# Altium schematic symbol library PCB-MAIN.SchLib: 248 symbols
Pins are listed as number, name and electrical type; pins without a type are passive.

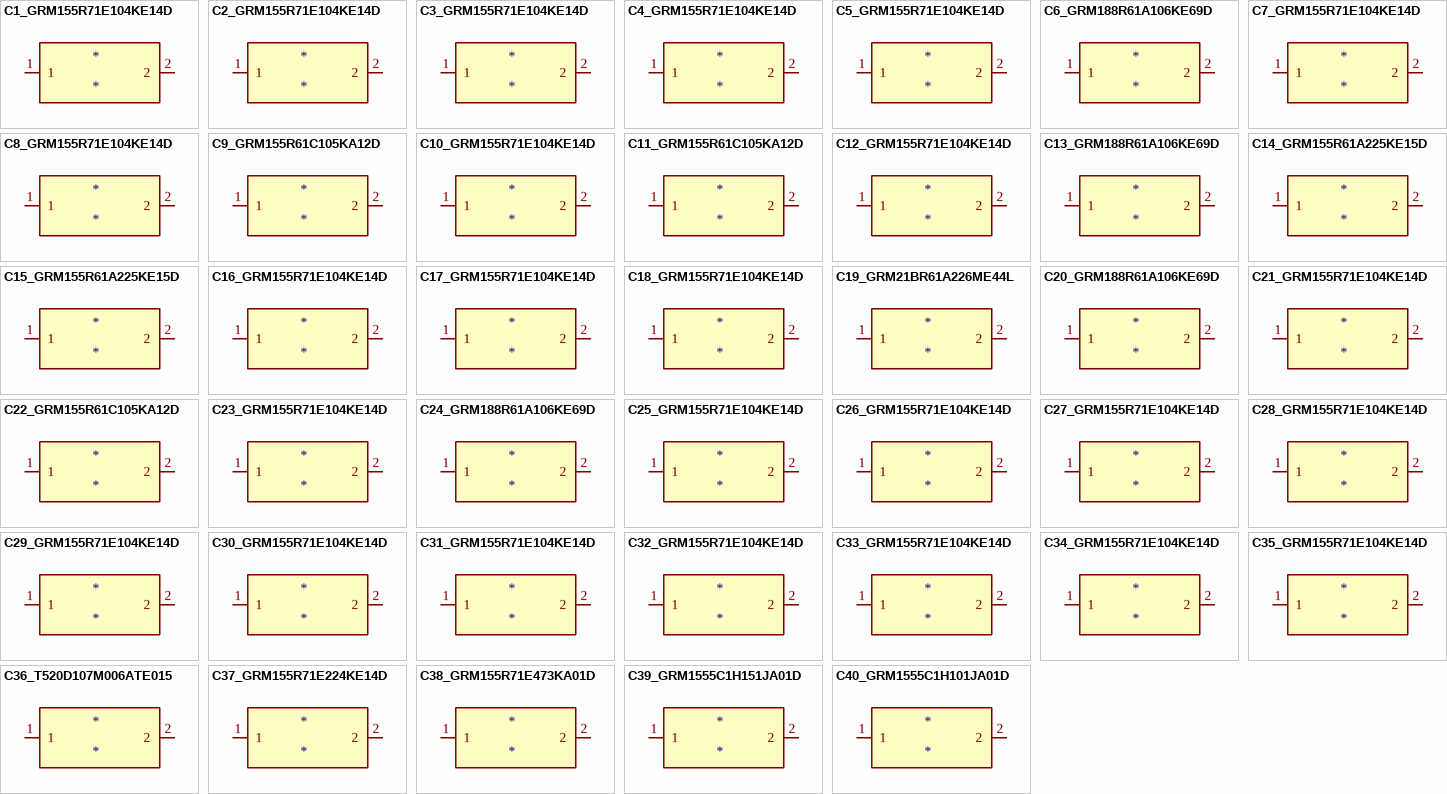
[diagram p0: symbols C1_GRM155R71E104KE14D to C40_GRM1555C1H101JA01D]

## C1_GRM155R71E104KE14D
designator *
pins: 1, 2

## C2_GRM155R71E104KE14D
designator *
pins: 1, 2

## C3_GRM155R71E104KE14D
designator *
pins: 1, 2

## C4_GRM155R71E104KE14D
designator *
pins: 1, 2

## C5_GRM155R71E104KE14D
designator *
pins: 1, 2

## C6_GRM188R61A106KE69D
designator *
pins: 1, 2

## C7_GRM155R71E104KE14D
designator *
pins: 1, 2

## C8_GRM155R71E104KE14D
designator *
pins: 1, 2

## C9_GRM155R61C105KA12D
designator *
pins: 1, 2

## C10_GRM155R71E104KE14D
designator *
pins: 1, 2

## C11_GRM155R61C105KA12D
designator *
pins: 1, 2

## C12_GRM155R71E104KE14D
designator *
pins: 1, 2

## C13_GRM188R61A106KE69D
designator *
pins: 1, 2

## C14_GRM155R61A225KE15D
designator *
pins: 1, 2

## C15_GRM155R61A225KE15D
designator *
pins: 1, 2

## C16_GRM155R71E104KE14D
designator *
pins: 1, 2

## C17_GRM155R71E104KE14D
designator *
pins: 1, 2

## C18_GRM155R71E104KE14D
designator *
pins: 1, 2

## C19_GRM21BR61A226ME44L
designator *
pins: 1, 2

## C20_GRM188R61A106KE69D
designator *
pins: 1, 2

## C21_GRM155R71E104KE14D
designator *
pins: 1, 2

## C22_GRM155R61C105KA12D
designator *
pins: 1, 2

## C23_GRM155R71E104KE14D
designator *
pins: 1, 2

## C24_GRM188R61A106KE69D
designator *
pins: 1, 2

## C25_GRM155R71E104KE14D
designator *
pins: 1, 2

## C26_GRM155R71E104KE14D
designator *
pins: 1, 2

## C27_GRM155R71E104KE14D
designator *
pins: 1, 2

## C28_GRM155R71E104KE14D
designator *
pins: 1, 2

## C29_GRM155R71E104KE14D
designator *
pins: 1, 2

## C30_GRM155R71E104KE14D
designator *
pins: 1, 2

## C31_GRM155R71E104KE14D
designator *
pins: 1, 2

## C32_GRM155R71E104KE14D
designator *
pins: 1, 2

## C33_GRM155R71E104KE14D
designator *
pins: 1, 2

## C34_GRM155R71E104KE14D
designator *
pins: 1, 2

## C35_GRM155R71E104KE14D
designator *
pins: 1, 2

## C36_T520D107M006ATE015
designator *
pins: 1, 2

## C37_GRM155R71E224KE14D
designator *
pins: 1, 2

## C38_GRM155R71E473KA01D
designator *
pins: 1, 2

## C39_GRM1555C1H151JA01D
designator *
pins: 1, 2

## C40_GRM1555C1H101JA01D
designator *
pins: 1, 2

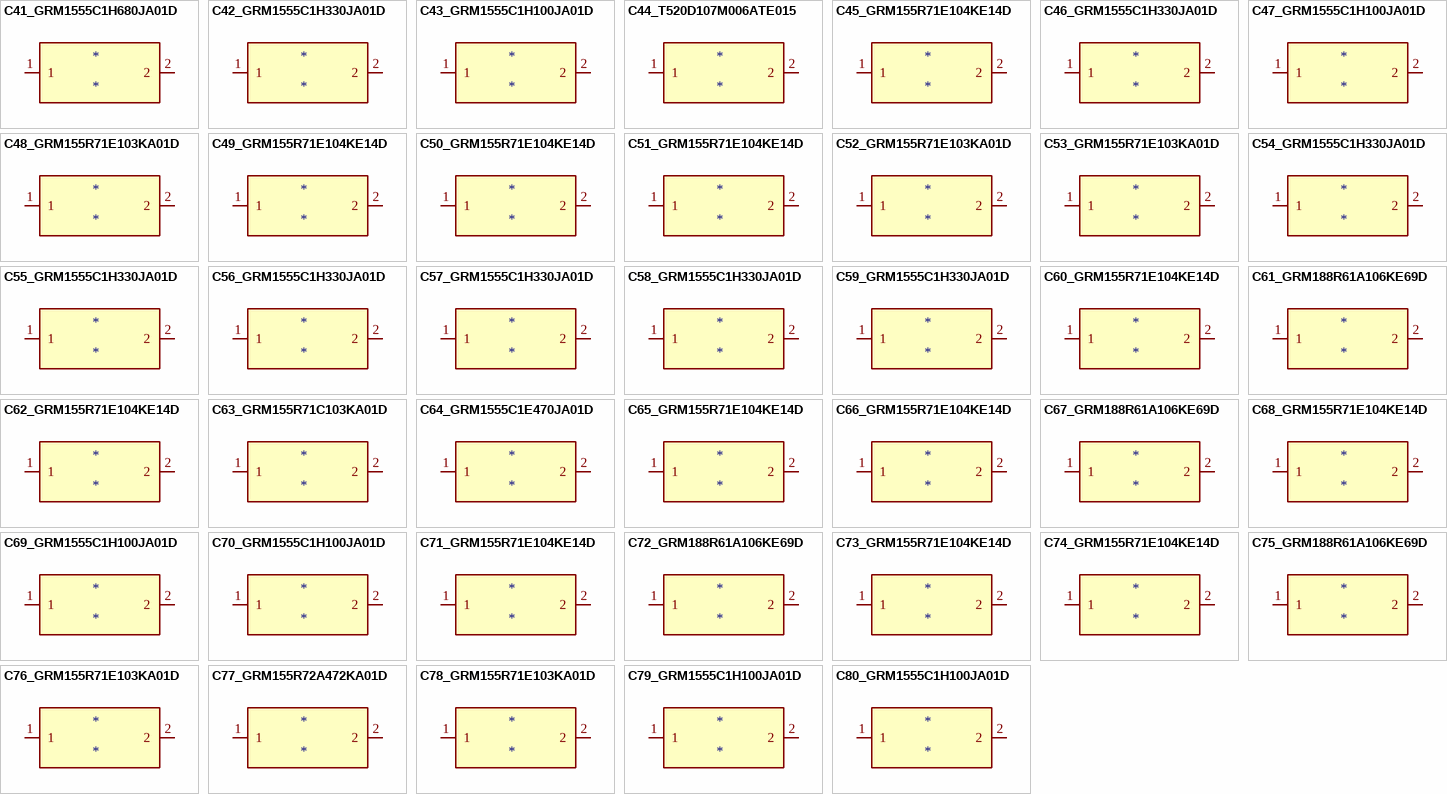
[diagram p1: symbols C41_GRM1555C1H680JA01D to C80_GRM1555C1H100JA01D]

## C41_GRM1555C1H680JA01D
designator *
pins: 1, 2

## C42_GRM1555C1H330JA01D
designator *
pins: 1, 2

## C43_GRM1555C1H100JA01D
designator *
pins: 1, 2

## C44_T520D107M006ATE015
designator *
pins: 1, 2

## C45_GRM155R71E104KE14D
designator *
pins: 1, 2

## C46_GRM1555C1H330JA01D
designator *
pins: 1, 2

## C47_GRM1555C1H100JA01D
designator *
pins: 1, 2

## C48_GRM155R71E103KA01D
designator *
pins: 1, 2

## C49_GRM155R71E104KE14D
designator *
pins: 1, 2

## C50_GRM155R71E104KE14D
designator *
pins: 1, 2

## C51_GRM155R71E104KE14D
designator *
pins: 1, 2

## C52_GRM155R71E103KA01D
designator *
pins: 1, 2

## C53_GRM155R71E103KA01D
designator *
pins: 1, 2

## C54_GRM1555C1H330JA01D
designator *
pins: 1, 2

## C55_GRM1555C1H330JA01D
designator *
pins: 1, 2

## C56_GRM1555C1H330JA01D
designator *
pins: 1, 2

## C57_GRM1555C1H330JA01D
designator *
pins: 1, 2

## C58_GRM1555C1H330JA01D
designator *
pins: 1, 2

## C59_GRM1555C1H330JA01D
designator *
pins: 1, 2

## C60_GRM155R71E104KE14D
designator *
pins: 1, 2

## C61_GRM188R61A106KE69D
designator *
pins: 1, 2

## C62_GRM155R71E104KE14D
designator *
pins: 1, 2

## C63_GRM155R71C103KA01D
designator *
pins: 1, 2

## C64_GRM1555C1E470JA01D
designator *
pins: 1, 2

## C65_GRM155R71E104KE14D
designator *
pins: 1, 2

## C66_GRM155R71E104KE14D
designator *
pins: 1, 2

## C67_GRM188R61A106KE69D
designator *
pins: 1, 2

## C68_GRM155R71E104KE14D
designator *
pins: 1, 2

## C69_GRM1555C1H100JA01D
designator *
pins: 1, 2

## C70_GRM1555C1H100JA01D
designator *
pins: 1, 2

## C71_GRM155R71E104KE14D
designator *
pins: 1, 2

## C72_GRM188R61A106KE69D
designator *
pins: 1, 2

## C73_GRM155R71E104KE14D
designator *
pins: 1, 2

## C74_GRM155R71E104KE14D
designator *
pins: 1, 2

## C75_GRM188R61A106KE69D
designator *
pins: 1, 2

## C76_GRM155R71E103KA01D
designator *
pins: 1, 2

## C77_GRM155R72A472KA01D
designator *
pins: 1, 2

## C78_GRM155R71E103KA01D
designator *
pins: 1, 2

## C79_GRM1555C1H100JA01D
designator *
pins: 1, 2

## C80_GRM1555C1H100JA01D
designator *
pins: 1, 2

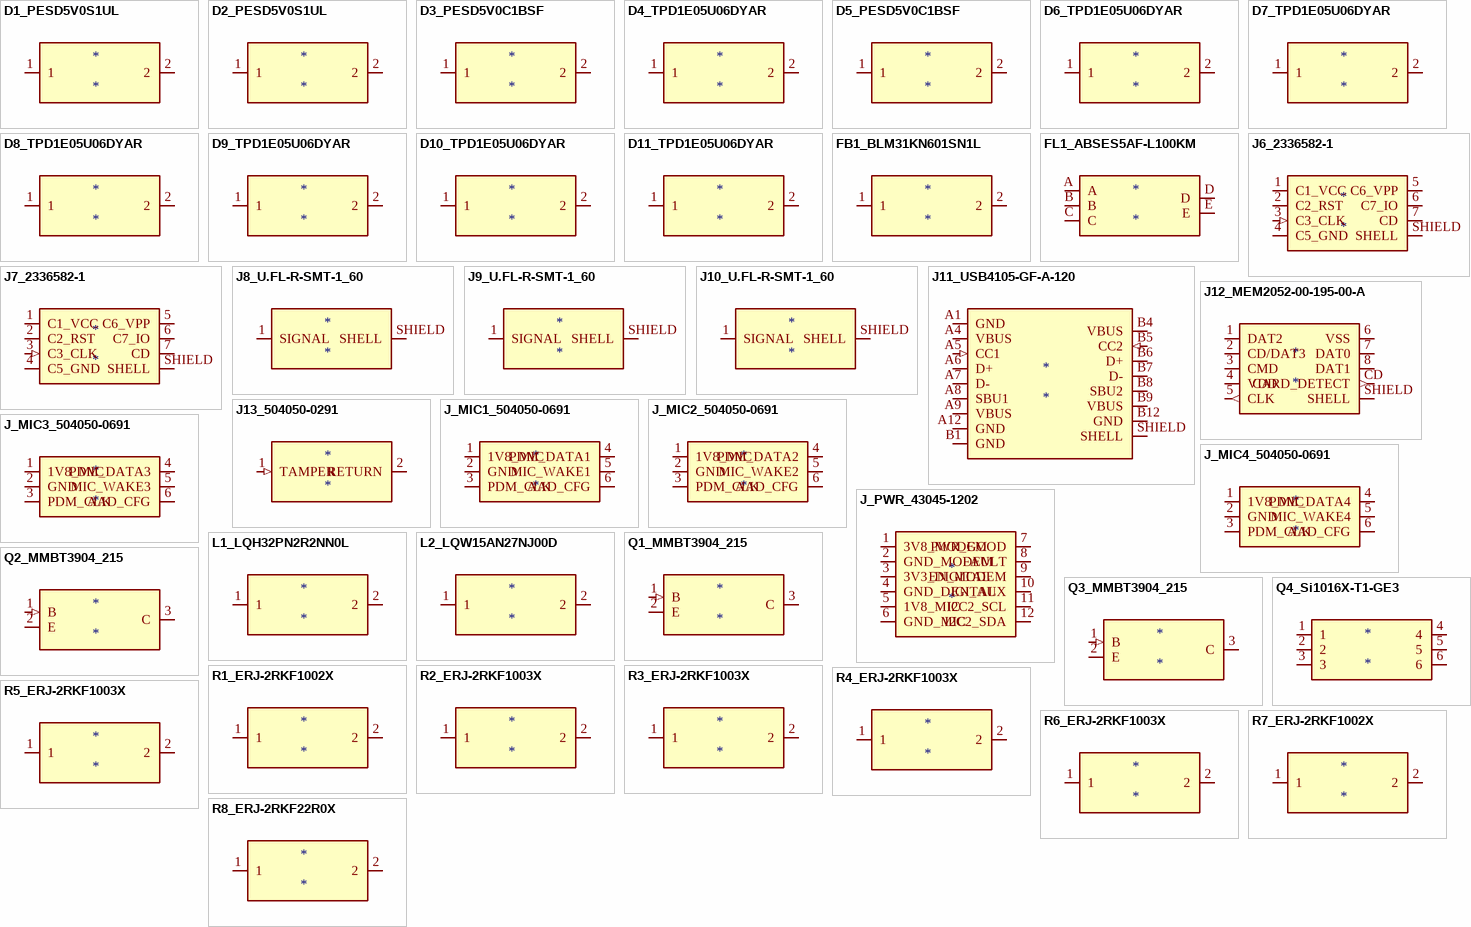
[diagram p2: symbols D1_PESD5V0S1UL to R8_ERJ-2RKF22R0X]

## D1_PESD5V0S1UL
designator *
pins: 1, 2

## D2_PESD5V0S1UL
designator *
pins: 1, 2

## D3_PESD5V0C1BSF
designator *
pins: 1, 2

## D4_TPD1E05U06DYAR
designator *
pins: 1, 2

## D5_PESD5V0C1BSF
designator *
pins: 1, 2

## D6_TPD1E05U06DYAR
designator *
pins: 1, 2

## D7_TPD1E05U06DYAR
designator *
pins: 1, 2

## D8_TPD1E05U06DYAR
designator *
pins: 1, 2

## D9_TPD1E05U06DYAR
designator *
pins: 1, 2

## D10_TPD1E05U06DYAR
designator *
pins: 1, 2

## D11_TPD1E05U06DYAR
designator *
pins: 1, 2

## FB1_BLM31KN601SN1L
designator *
pins: 1, 2

## FL1_ABSES5AF-L100KM
designator *
pins: A, B, C, D, E

## J6_2336582-1
designator *
pins: 1 C1_VCC, 2 C2_RST (io), 3 C3_CLK (in), 4 C5_GND, 5 C6_VPP, 6 C7_IO (io), 7 CD (io), SHIELD SHELL

## J7_2336582-1
designator *
pins: 1 C1_VCC, 2 C2_RST (io), 3 C3_CLK (in), 4 C5_GND, 5 C6_VPP, 6 C7_IO (io), 7 CD (io), SHIELD SHELL

## J8_U.FL-R-SMT-1_60
designator *
pins: 1 SIGNAL (io), SHIELD SHELL

## J9_U.FL-R-SMT-1_60
designator *
pins: 1 SIGNAL (io), SHIELD SHELL

## J10_U.FL-R-SMT-1_60
designator *
pins: 1 SIGNAL (io), SHIELD SHELL

## J11_USB4105-GF-A-120
designator *
pins: A1 GND, A4 VBUS, A5 CC1 (in), A6 D+ (io), A7 D- (io), A8 SBU1, A9 VBUS, A12 GND, B1 GND, B4 VBUS, B5 CC2 (in), B6 D+ (io), B7 D- (io), B8 SBU2, B9 VBUS, B12 GND, SHIELD SHELL

## J12_MEM2052-00-195-00-A
designator *
pins: 1 DAT2 (io), 2 CD/DAT3 (io), 3 CMD (io), 4 VDD, 5 CLK (out), 6 VSS, 7 DAT0 (io), 8 DAT1 (io), CD CARD_DETECT (out), SHIELD SHELL

## J13_504050-0291
designator *
pins: 1 TAMPER (in), 2 RETURN

## J_MIC1_504050-0691
designator *
pins: 1 1V8_MIC, 2 GND, 3 PDM_CLK, 4 PDM_DATA1, 5 MIC_WAKE1, 6 AAD_CFG

## J_MIC2_504050-0691
designator *
pins: 1 1V8_MIC, 2 GND, 3 PDM_CLK, 4 PDM_DATA2, 5 MIC_WAKE2, 6 AAD_CFG

## J_MIC3_504050-0691
designator *
pins: 1 1V8_MIC, 2 GND, 3 PDM_CLK, 4 PDM_DATA3, 5 MIC_WAKE3, 6 AAD_CFG

## J_MIC4_504050-0691
designator *
pins: 1 1V8_MIC, 2 GND, 3 PDM_CLK, 4 PDM_DATA4, 5 MIC_WAKE4, 6 AAD_CFG

## J_PWR_43045-1202
designator *
pins: 1 3V8_MODEM, 2 GND_MODEM, 3 3V3_DIGITAL, 4 GND_DIGITAL, 5 1V8_MIC, 6 GND_MIC, 7 PWR_GOOD, 8 FAULT, 9 EN_MODEM, 10 EN_AUX, 11 I2C2_SCL (io), 12 I2C2_SDA (io)

## L1_LQH32PN2R2NN0L
designator *
pins: 1, 2

## L2_LQW15AN27NJ00D
designator *
pins: 1, 2

## Q1_MMBT3904_215
designator *
pins: 1 B (in), 2 E, 3 C (oc)

## Q2_MMBT3904_215
designator *
pins: 1 B (in), 2 E, 3 C (oc)

## Q3_MMBT3904_215
designator *
pins: 1 B (in), 2 E, 3 C (oc)

## Q4_Si1016X-T1-GE3
designator *
pins: 1, 2, 3, 4, 5, 6

## R1_ERJ-2RKF1002X
designator *
pins: 1, 2

## R2_ERJ-2RKF1003X
designator *
pins: 1, 2

## R3_ERJ-2RKF1003X
designator *
pins: 1, 2

## R4_ERJ-2RKF1003X
designator *
pins: 1, 2

## R5_ERJ-2RKF1003X
designator *
pins: 1, 2

## R6_ERJ-2RKF1003X
designator *
pins: 1, 2

## R7_ERJ-2RKF1002X
designator *
pins: 1, 2

## R8_ERJ-2RKF22R0X
designator *
pins: 1, 2

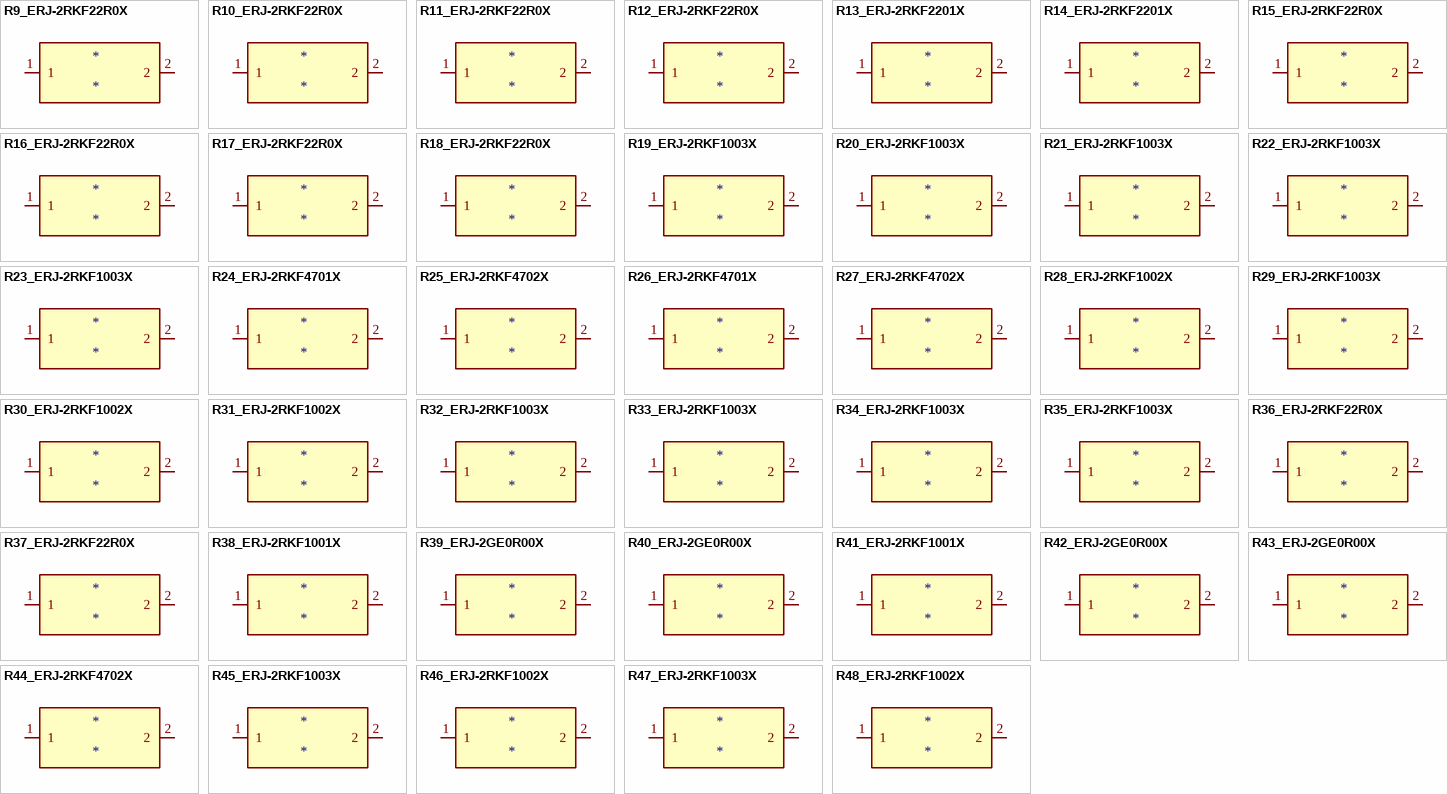
[diagram p3: symbols R9_ERJ-2RKF22R0X to R48_ERJ-2RKF1002X]

## R9_ERJ-2RKF22R0X
designator *
pins: 1, 2

## R10_ERJ-2RKF22R0X
designator *
pins: 1, 2

## R11_ERJ-2RKF22R0X
designator *
pins: 1, 2

## R12_ERJ-2RKF22R0X
designator *
pins: 1, 2

## R13_ERJ-2RKF2201X
designator *
pins: 1, 2

## R14_ERJ-2RKF2201X
designator *
pins: 1, 2

## R15_ERJ-2RKF22R0X
designator *
pins: 1, 2

## R16_ERJ-2RKF22R0X
designator *
pins: 1, 2

## R17_ERJ-2RKF22R0X
designator *
pins: 1, 2

## R18_ERJ-2RKF22R0X
designator *
pins: 1, 2

## R19_ERJ-2RKF1003X
designator *
pins: 1, 2

## R20_ERJ-2RKF1003X
designator *
pins: 1, 2

## R21_ERJ-2RKF1003X
designator *
pins: 1, 2

## R22_ERJ-2RKF1003X
designator *
pins: 1, 2

## R23_ERJ-2RKF1003X
designator *
pins: 1, 2

## R24_ERJ-2RKF4701X
designator *
pins: 1, 2

## R25_ERJ-2RKF4702X
designator *
pins: 1, 2

## R26_ERJ-2RKF4701X
designator *
pins: 1, 2

## R27_ERJ-2RKF4702X
designator *
pins: 1, 2

## R28_ERJ-2RKF1002X
designator *
pins: 1, 2

## R29_ERJ-2RKF1003X
designator *
pins: 1, 2

## R30_ERJ-2RKF1002X
designator *
pins: 1, 2

## R31_ERJ-2RKF1002X
designator *
pins: 1, 2

## R32_ERJ-2RKF1003X
designator *
pins: 1, 2

## R33_ERJ-2RKF1003X
designator *
pins: 1, 2

## R34_ERJ-2RKF1003X
designator *
pins: 1, 2

## R35_ERJ-2RKF1003X
designator *
pins: 1, 2

## R36_ERJ-2RKF22R0X
designator *
pins: 1, 2

## R37_ERJ-2RKF22R0X
designator *
pins: 1, 2

## R38_ERJ-2RKF1001X
designator *
pins: 1, 2

## R39_ERJ-2GE0R00X
designator *
pins: 1, 2

## R40_ERJ-2GE0R00X
designator *
pins: 1, 2

## R41_ERJ-2RKF1001X
designator *
pins: 1, 2

## R42_ERJ-2GE0R00X
designator *
pins: 1, 2

## R43_ERJ-2GE0R00X
designator *
pins: 1, 2

## R44_ERJ-2RKF4702X
designator *
pins: 1, 2

## R45_ERJ-2RKF1003X
designator *
pins: 1, 2

## R46_ERJ-2RKF1002X
designator *
pins: 1, 2

## R47_ERJ-2RKF1003X
designator *
pins: 1, 2

## R48_ERJ-2RKF1002X
designator *
pins: 1, 2

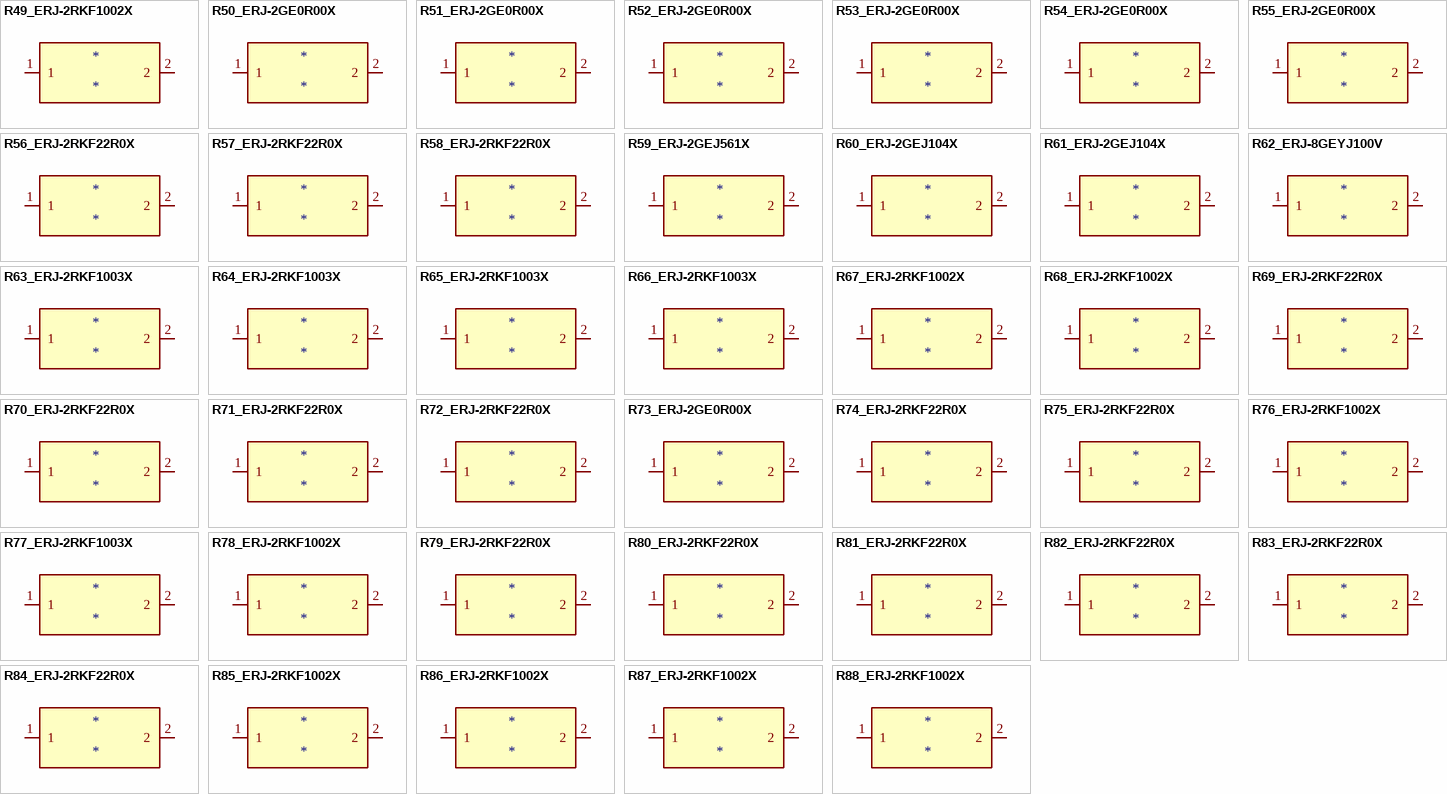
[diagram p4: symbols R49_ERJ-2RKF1002X to R88_ERJ-2RKF1002X]

## R49_ERJ-2RKF1002X
designator *
pins: 1, 2

## R50_ERJ-2GE0R00X
designator *
pins: 1, 2

## R51_ERJ-2GE0R00X
designator *
pins: 1, 2

## R52_ERJ-2GE0R00X
designator *
pins: 1, 2

## R53_ERJ-2GE0R00X
designator *
pins: 1, 2

## R54_ERJ-2GE0R00X
designator *
pins: 1, 2

## R55_ERJ-2GE0R00X
designator *
pins: 1, 2

## R56_ERJ-2RKF22R0X
designator *
pins: 1, 2

## R57_ERJ-2RKF22R0X
designator *
pins: 1, 2

## R58_ERJ-2RKF22R0X
designator *
pins: 1, 2

## R59_ERJ-2GEJ561X
designator *
pins: 1, 2

## R60_ERJ-2GEJ104X
designator *
pins: 1, 2

## R61_ERJ-2GEJ104X
designator *
pins: 1, 2

## R62_ERJ-8GEYJ100V
designator *
pins: 1, 2

## R63_ERJ-2RKF1003X
designator *
pins: 1, 2

## R64_ERJ-2RKF1003X
designator *
pins: 1, 2

## R65_ERJ-2RKF1003X
designator *
pins: 1, 2

## R66_ERJ-2RKF1003X
designator *
pins: 1, 2

## R67_ERJ-2RKF1002X
designator *
pins: 1, 2

## R68_ERJ-2RKF1002X
designator *
pins: 1, 2

## R69_ERJ-2RKF22R0X
designator *
pins: 1, 2

## R70_ERJ-2RKF22R0X
designator *
pins: 1, 2

## R71_ERJ-2RKF22R0X
designator *
pins: 1, 2

## R72_ERJ-2RKF22R0X
designator *
pins: 1, 2

## R73_ERJ-2GE0R00X
designator *
pins: 1, 2

## R74_ERJ-2RKF22R0X
designator *
pins: 1, 2

## R75_ERJ-2RKF22R0X
designator *
pins: 1, 2

## R76_ERJ-2RKF1002X
designator *
pins: 1, 2

## R77_ERJ-2RKF1003X
designator *
pins: 1, 2

## R78_ERJ-2RKF1002X
designator *
pins: 1, 2

## R79_ERJ-2RKF22R0X
designator *
pins: 1, 2

## R80_ERJ-2RKF22R0X
designator *
pins: 1, 2

## R81_ERJ-2RKF22R0X
designator *
pins: 1, 2

## R82_ERJ-2RKF22R0X
designator *
pins: 1, 2

## R83_ERJ-2RKF22R0X
designator *
pins: 1, 2

## R84_ERJ-2RKF22R0X
designator *
pins: 1, 2

## R85_ERJ-2RKF1002X
designator *
pins: 1, 2

## R86_ERJ-2RKF1002X
designator *
pins: 1, 2

## R87_ERJ-2RKF1002X
designator *
pins: 1, 2

## R88_ERJ-2RKF1002X
designator *
pins: 1, 2

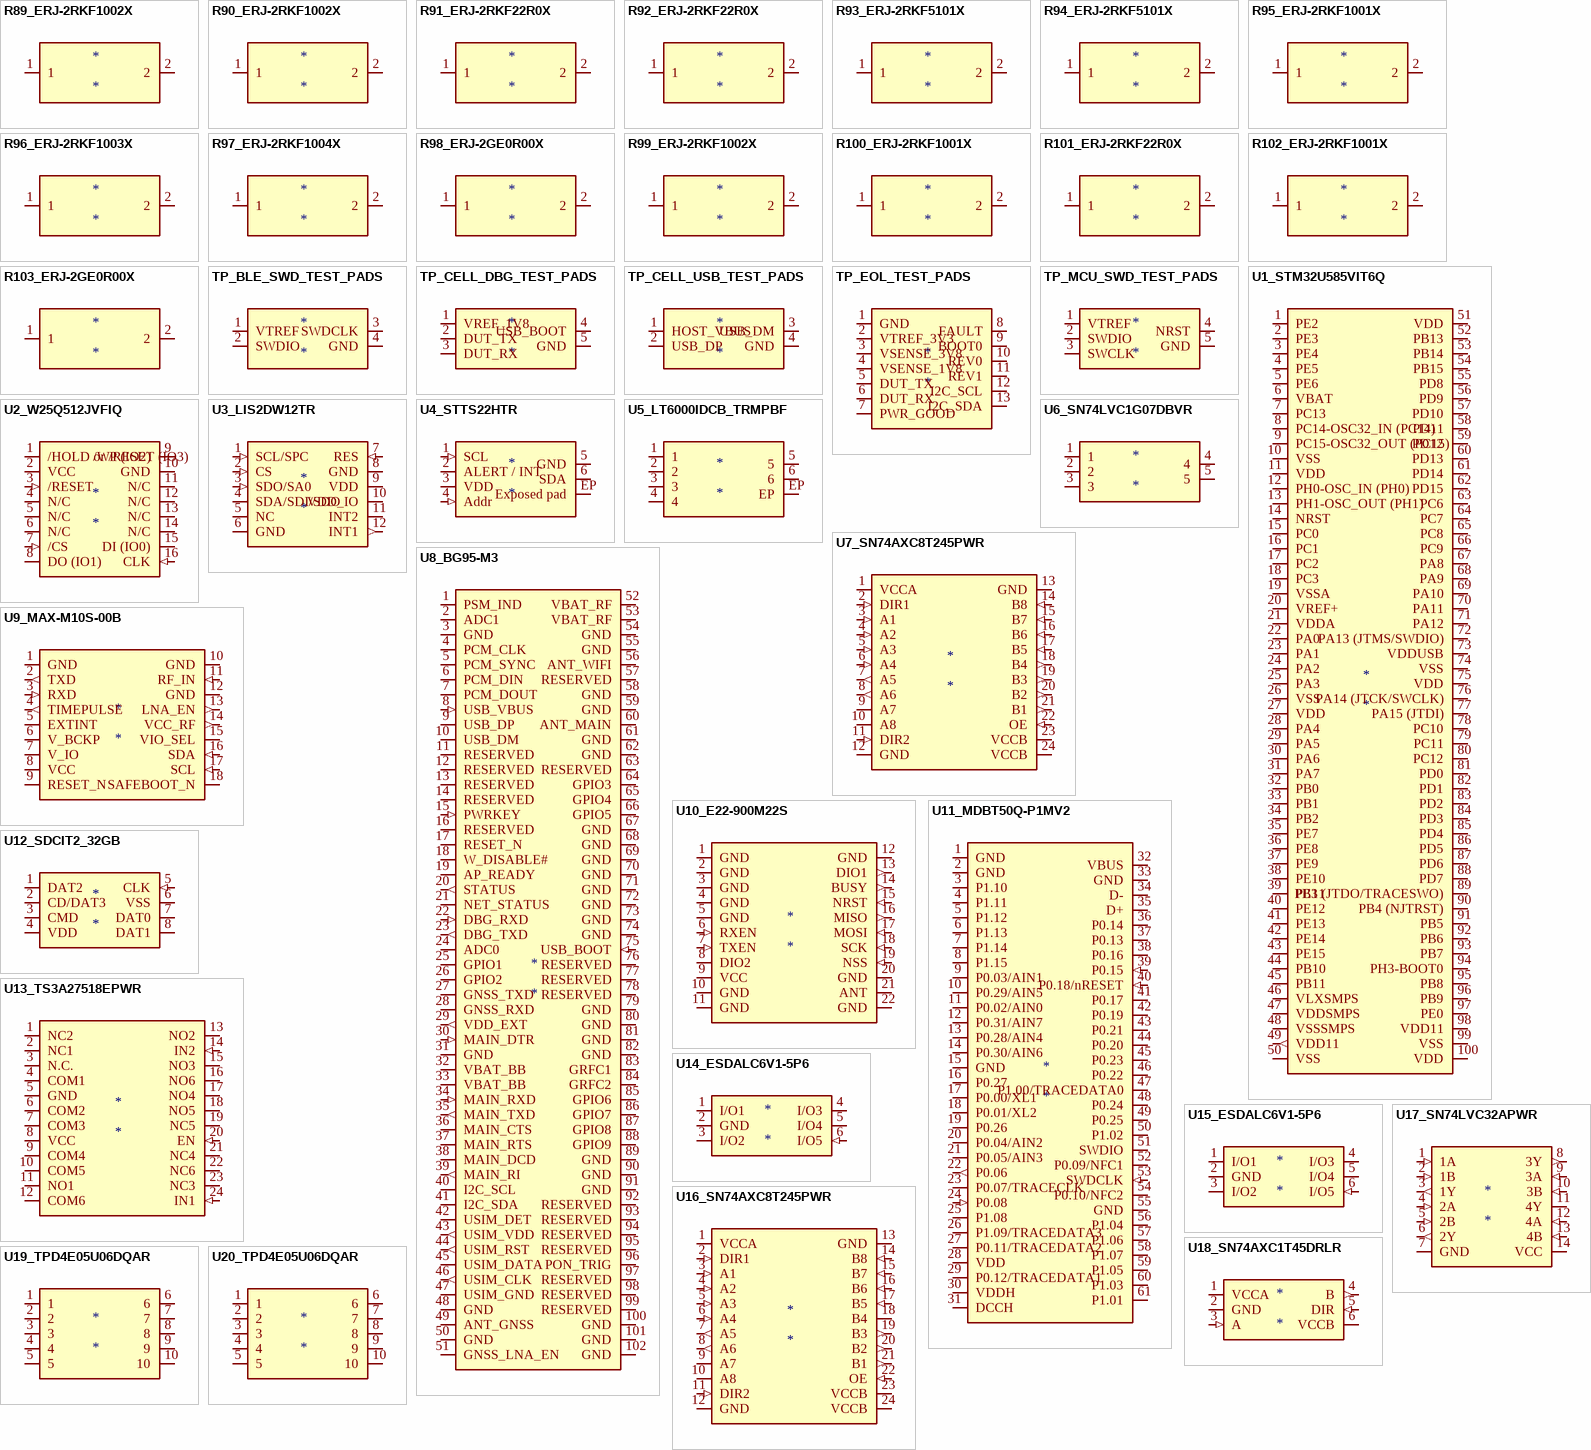
[diagram p5: symbols R89_ERJ-2RKF1002X to U20_TPD4E05U06DQAR]

## R89_ERJ-2RKF1002X
designator *
pins: 1, 2

## R90_ERJ-2RKF1002X
designator *
pins: 1, 2

## R91_ERJ-2RKF22R0X
designator *
pins: 1, 2

## R92_ERJ-2RKF22R0X
designator *
pins: 1, 2

## R93_ERJ-2RKF5101X
designator *
pins: 1, 2

## R94_ERJ-2RKF5101X
designator *
pins: 1, 2

## R95_ERJ-2RKF1001X
designator *
pins: 1, 2

## R96_ERJ-2RKF1003X
designator *
pins: 1, 2

## R97_ERJ-2RKF1004X
designator *
pins: 1, 2

## R98_ERJ-2GE0R00X
designator *
pins: 1, 2

## R99_ERJ-2RKF1002X
designator *
pins: 1, 2

## R100_ERJ-2RKF1001X
designator *
pins: 1, 2

## R101_ERJ-2RKF22R0X
designator *
pins: 1, 2

## R102_ERJ-2RKF1001X
designator *
pins: 1, 2

## R103_ERJ-2GE0R00X
designator *
pins: 1, 2

## TP_BLE_SWD_TEST_PADS
designator *
pins: 1 VTREF, 2 SWDIO, 3 SWDCLK, 4 GND

## TP_CELL_DBG_TEST_PADS
designator *
pins: 1 VREF_1V8, 2 DUT_TX, 3 DUT_RX, 4 USB_BOOT, 5 GND

## TP_CELL_USB_TEST_PADS
designator *
pins: 1 HOST_VBUS, 2 USB_DP, 3 USB_DM, 4 GND

## TP_EOL_TEST_PADS
designator *
pins: 1 GND, 2 VTREF_3V3, 3 VSENSE_3V8, 4 VSENSE_1V8, 5 DUT_TX, 6 DUT_RX, 7 PWR_GOOD, 8 FAULT, 9 BOOT0, 10 REV0, 11 REV1, 12 I2C_SCL, 13 I2C_SDA

## TP_MCU_SWD_TEST_PADS
designator *
pins: 1 VTREF, 2 SWDIO, 3 SWCLK, 4 NRST, 5 GND

## U1_STM32U585VIT6Q
designator *
pins: 1 PE2, 2 PE3, 3 PE4, 4 PE5, 5 PE6, 6 VBAT, 7 PC13, 8 PC14-OSC32_IN (PC14), 9 PC15-OSC32_OUT (PC15), 10 VSS, 11 VDD, 12 PH0-OSC_IN (PH0), 13 PH1-OSC_OUT (PH1), 14 NRST, 15 PC0, 16 PC1, 17 PC2, 18 PC3, 19 VSSA, 20 VREF+, 21 VDDA, 22 PA0, 23 PA1, 24 PA2, 25 PA3, 26 VSS, 27 VDD, 28 PA4, 29 PA5, 30 PA6, 31 PA7, 32 PB0, 33 PB1, 34 PB2, 35 PE7, 36 PE8, 37 PE9, 38 PE10, 39 PE11, 40 PE12, 41 PE13, 42 PE14, 43 PE15, 44 PB10, 45 PB11, 46 VLXSMPS, 47 VDDSMPS, 48 VSSSMPS, 49 VDD11 (out), 50 VSS, 51 VDD, 52 PB13, 53 PB14, 54 PB15, 55 PD8, 56 PD9, 57 PD10, 58 PD11, 59 PD12, 60 PD13, 61 PD14, 62 PD15, 63 PC6, 64 PC7, 65 PC8, 66 PC9, 67 PA8, 68 PA9, 69 PA10, 70 PA11, 71 PA12, 72 PA13 (JTMS/SWDIO), 73 VDDUSB, 74 VSS, 75 VDD, 76 PA14 (JTCK/SWCLK), 77 PA15 (JTDI), 78 PC10, 79 PC11, 80 PC12, 81 PD0, 82 PD1, 83 PD2, 84 PD3, 85 PD4, 86 PD5, 87 PD6, 88 PD7, 89 PB3 (JTDO/TRACESWO), 90 PB4 (NJTRST), 91 PB5, 92 PB6, 93 PB7, 94 PH3-BOOT0, 95 PB8, 96 PB9, 97 PE0, 98 VDD11, 99 VSS, 100 VDD

## U2_W25Q512JVFIQ
designator *
pins: 1 /HOLD or /RESET (IO3) (io), 2 VCC, 3 /RESET (in), 4 N/C, 5 N/C, 6 N/C, 7 /CS (in), 8 DO (IO1) (io), 9 /WP (IO2) (io), 10 GND, 11 N/C, 12 N/C, 13 N/C, 14 N/C, 15 DI (IO0) (io), 16 CLK (in)

## U3_LIS2DW12TR
designator *
pins: 1 SCL/SPC (in), 2 CS (in), 3 SDO/SA0 (in), 4 SDA/SDI/SDO (io), 5 NC, 6 GND, 7 RES (in), 8 GND, 9 VDD, 10 VDD_IO, 11 INT2, 12 INT1 (out)

## U4_STTS22HTR
designator *
pins: 1 SCL (in), 2 ALERT / INT, 3 VDD, 4 Addr (in), 5 GND, 6 SDA (io), EP Exposed pad

## U5_LT6000IDCB_TRMPBF
designator *
pins: 1, 2, 3, 4, 5, 6, EP

## U6_SN74LVC1G07DBVR
designator *
pins: 1, 2, 3, 4, 5

## U7_SN74AXC8T245PWR
designator *
pins: 1 VCCA, 2 DIR1 (in), 3 A1 (in), 4 A2 (in), 5 A3 (in), 6 A4 (in), 7 A5 (out), 8 A6 (out), 9 A7, 10 A8, 11 DIR2 (in), 12 GND, 13 GND, 14 B8 (in), 15 B7 (in), 16 B6 (in), 17 B5 (in), 18 B4 (out), 19 B3 (out), 20 B2 (out), 21 B1 (out), 22 OE (in), 23 VCCB, 24 VCCB

## U8_BG95-M3
designator *
pins: 1 PSM_IND, 2 ADC1, 3 GND, 4 PCM_CLK, 5 PCM_SYNC, 6 PCM_DIN, 7 PCM_DOUT, 8 USB_VBUS (in), 9 USB_DP (io), 10 USB_DM (io), 11 RESERVED, 12 RESERVED, 13 RESERVED, 14 RESERVED, 15 PWRKEY (in), 16 RESERVED, 17 RESET_N, 18 W_DISABLE#, 19 AP_READY, 20 STATUS (out), 21 NET_STATUS, 22 DBG_RXD (in), 23 DBG_TXD (out), 24 ADC0, 25 GPIO1, 26 GPIO2, 27 GNSS_TXD, 28 GNSS_RXD, 29 VDD_EXT (out), 30 MAIN_DTR (in), 31 GND, 32 VBAT_BB, 33 VBAT_BB, 34 MAIN_RXD (in), 35 MAIN_TXD (out), 36 MAIN_CTS, 37 MAIN_RTS, 38 MAIN_DCD, 39 MAIN_RI (out), 40 I2C_SCL, 41 I2C_SDA, 42 USIM_DET, 43 USIM_VDD (out), 44 USIM_RST (out), 45 USIM_DATA (io), 46 USIM_CLK (out), 47 USIM_GND, 48 GND, 49 ANT_GNSS, 50 GND, 51 GNSS_LNA_EN, 52 VBAT_RF, 53 VBAT_RF, 54 GND, 55 GND, 56 ANT_WIFI, 57 RESERVED, 58 GND, 59 GND, 60 ANT_MAIN (io), 61 GND, 62 GND, 63 RESERVED, 64 GPIO3, 65 GPIO4, 66 GPIO5, 67 GND, 68 GND, 69 GND, 70 GND, 71 GND, 72 GND, 73 GND, 74 GND, 75 USB_BOOT (in), 76 RESERVED, 77 RESERVED, 78 RESERVED, 79 GND, 80 GND, 81 GND, 82 GND, 83 GRFC1, 84 GRFC2, 85 GPIO6, 86 GPIO7, 87 GPIO8, 88 GPIO9, 89 GND, 90 GND, 91 GND, 92 RESERVED, 93 RESERVED, 94 RESERVED, 95 RESERVED, 96 PON_TRIG, 97 RESERVED, 98 RESERVED, 99 RESERVED, 100 GND, 101 GND, 102 GND

## U9_MAX-M10S-00B
designator *
pins: 1 GND, 2 TXD (out), 3 RXD (in), 4 TIMEPULSE (out), 5 EXTINT, 6 V_BCKP, 7 V_IO, 8 VCC, 9 RESET_N, 10 GND, 11 RF_IN (in), 12 GND, 13 LNA_EN (out), 14 VCC_RF (out), 15 VIO_SEL, 16 SDA (in), 17 SCL (in), 18 SAFEBOOT_N

## U10_E22-900M22S
designator *
pins: 1 GND, 2 GND, 3 GND, 4 GND, 5 GND, 6 RXEN (in), 7 TXEN (in), 8 DIO2, 9 VCC, 10 GND, 11 GND, 12 GND, 13 DIO1 (out), 14 BUSY (out), 15 NRST (in), 16 MISO (out), 17 MOSI (in), 18 SCK (in), 19 NSS (in), 20 GND, 21 ANT (io), 22 GND

## U11_MDBT50Q-P1MV2
designator *
pins: 1 GND, 2 GND, 3 P1.10, 4 P1.11, 5 P1.12, 6 P1.13, 7 P1.14, 8 P1.15, 9 P0.03/AIN1, 10 P0.29/AIN5, 11 P0.02/AIN0, 12 P0.31/AIN7, 13 P0.28/AIN4, 14 P0.30/AIN6, 15 GND, 16 P0.27, 17 P0.00/XL1, 18 P0.01/XL2, 19 P0.26, 20 P0.04/AIN2, 21 P0.05/AIN3, 22 P0.06 (out), 23 P0.07/TRACECLK, 24 P0.08 (in), 25 P1.08, 26 P1.09/TRACEDATA3, 27 P0.11/TRACEDATA2, 28 VDD, 29 P0.12/TRACEDATA1, 30 VDDH, 31 DCCH, 32 VBUS, 33 GND, 34 D-, 35 D+, 36 P0.14, 37 P0.13, 38 P0.16, 39 P0.15 (in), 40 P0.18/nRESET (in), 41 P0.17, 42 P0.19, 43 P0.21, 44 P0.20, 45 P0.23, 46 P0.22, 47 P1.00/TRACEDATA0, 48 P0.24, 49 P0.25, 50 P1.02, 51 SWDIO (io), 52 P0.09/NFC1, 53 SWDCLK (in), 54 P0.10/NFC2, 55 GND, 56 P1.04, 57 P1.06, 58 P1.07, 59 P1.05, 60 P1.03, 61 P1.01

## U12_SDCIT2_32GB
designator *
pins: 1 DAT2 (io), 2 CD/DAT3 (io), 3 CMD (io), 4 VDD, 5 CLK (in), 6 VSS, 7 DAT0 (io), 8 DAT1 (io)

## U13_TS3A27518EPWR
designator *
pins: 1 NC2 (io), 2 NC1 (io), 3 N.C., 4 COM1 (io), 5 GND, 6 COM2 (io), 7 COM3 (io), 8 VCC, 9 COM4 (io), 10 COM5 (io), 11 NO1 (io), 12 COM6 (io), 13 NO2 (io), 14 IN2 (in), 15 NO3 (io), 16 NO6 (io), 17 NO4 (io), 18 NO5 (io), 19 NC5 (io), 20 EN (in), 21 NC4 (io), 22 NC6 (io), 23 NC3 (io), 24 IN1 (in)

## U14_ESDALC6V1-5P6
designator *
pins: 1 I/O1 (io), 2 GND, 3 I/O2 (io), 4 I/O3 (io), 5 I/O4 (io), 6 I/O5 (in)

## U15_ESDALC6V1-5P6
designator *
pins: 1 I/O1 (io), 2 GND, 3 I/O2 (io), 4 I/O3 (io), 5 I/O4 (io), 6 I/O5 (in)

## U16_SN74AXC8T245PWR
designator *
pins: 1 VCCA, 2 DIR1 (in), 3 A1 (in), 4 A2 (in), 5 A3 (in), 6 A4 (in), 7 A5 (out), 8 A6 (out), 9 A7, 10 A8, 11 DIR2 (in), 12 GND, 13 GND, 14 B8 (in), 15 B7 (in), 16 B6 (in), 17 B5 (in), 18 B4, 19 B3 (out), 20 B2 (out), 21 B1 (out), 22 OE (in), 23 VCCB, 24 VCCB

## U17_SN74LVC32APWR
designator *
pins: 1 1A (in), 2 1B (in), 3 1Y (out), 4 2A (in), 5 2B (in), 6 2Y (out), 7 GND, 8 3Y (out), 9 3A (in), 10 3B (in), 11 4Y, 12 4A (in), 13 4B (in), 14 VCC

## U18_SN74AXC1T45DRLR
designator *
pins: 1 VCCA, 2 GND, 3 A (in), 4 B (out), 5 DIR (in), 6 VCCB

## U19_TPD4E05U06DQAR
designator *
pins: 1, 2, 3, 4, 5, 6, 7, 8, 9, 10

## U20_TPD4E05U06DQAR
designator *
pins: 1, 2, 3, 4, 5, 6, 7, 8, 9, 10

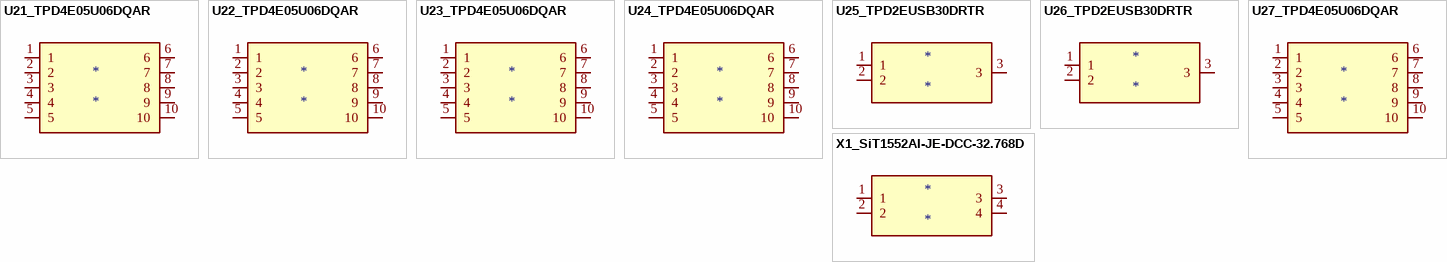
[diagram p6: symbols U21_TPD4E05U06DQAR to X1_SiT1552AI-JE-DCC-32.768D]

## U21_TPD4E05U06DQAR
designator *
pins: 1, 2, 3, 4, 5, 6, 7, 8, 9, 10

## U22_TPD4E05U06DQAR
designator *
pins: 1, 2, 3, 4, 5, 6, 7, 8, 9, 10

## U23_TPD4E05U06DQAR
designator *
pins: 1, 2, 3, 4, 5, 6, 7, 8, 9, 10

## U24_TPD4E05U06DQAR
designator *
pins: 1, 2, 3, 4, 5, 6, 7, 8, 9, 10

## U25_TPD2EUSB30DRTR
designator *
pins: 1, 2, 3

## U26_TPD2EUSB30DRTR
designator *
pins: 1, 2, 3

## U27_TPD4E05U06DQAR
designator *
pins: 1, 2, 3, 4, 5, 6, 7, 8, 9, 10

## X1_SiT1552AI-JE-DCC-32.768D
designator *
pins: 1, 2, 3, 4